# Altium footprint library CzytnikKartSD.PcbLib: 1 footprints
Each footprint in its own frame and in the unit in brackets; x right, y up, seen from the top. Pads: shape width x height; smd on the part's side, far side on the other; paste and mask are expansions set on the pad; w line width, h text height; cw(c..) or ccw(c..) is an arc to the next point about the centre after c.
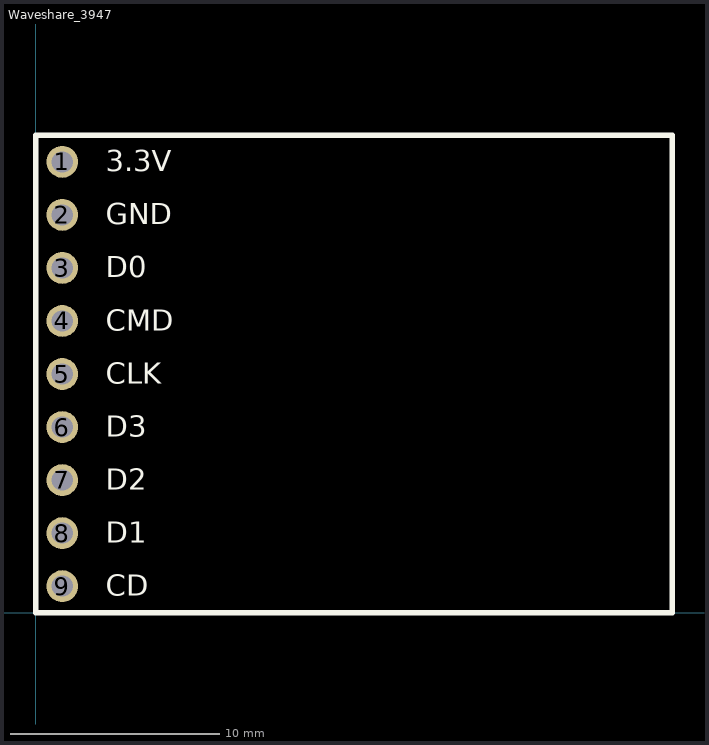
[diagram p0: the footprint, top view; thin cyan lines are the x and y axes]

## Waveshare_3947 [mil]
pads (9):
  round 60 hole 40: 1(50,850) 2(50,750) 3(50,650) 4(50,550) 5(50,450) 6(50,350) 7(50,250) 8(50,150) 9(50,50)
Top Overlay:
  lines w10: 0,0 1200,0 1200,900 0,900 0,0
  text "3.3V" at 132,832 h40
  text "GND" at 132,732 h40
  text "D0" at 132,632 h40
  text "CMD" at 132,532 h40
  text "CLK" at 132,432 h40
  text "D3" at 132,332 h40
  text "D2" at 132,232 h40
  text "D1" at 132,132 h40
  text "CD" at 132,32 h40